# Altium footprint library PcbLib1.PcbLib: 24 footprints (part 2 of 2)
Each footprint in its own frame and in the unit in brackets; x right, y up, seen from the top. Pads: shape width x height; smd on the part's side, far side on the other; paste and mask are expansions set on the pad; w line width, h text height; cw(c..) or ccw(c..) is an arc to the next point about the centre after c.
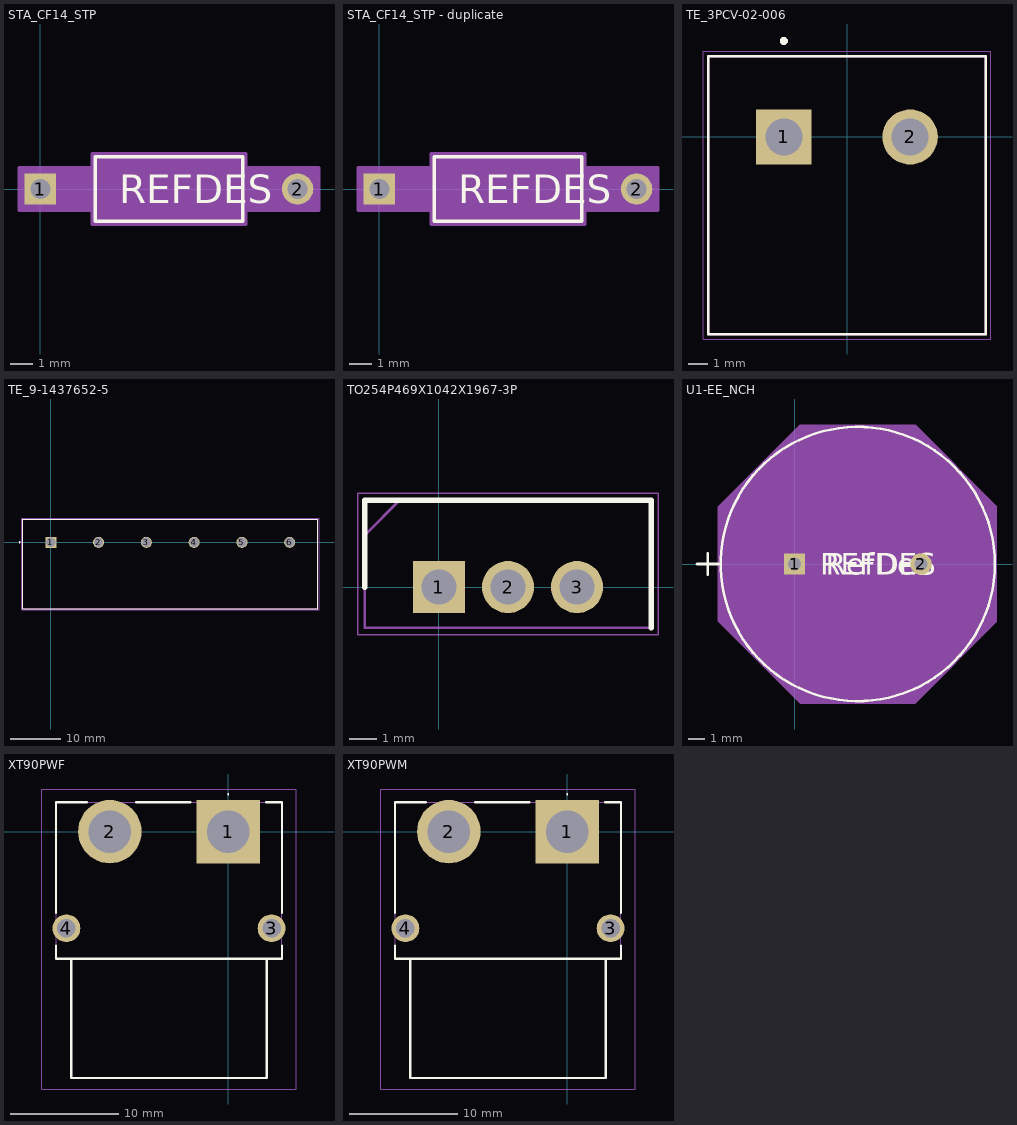
[diagram p1: the footprints below, top view; thin cyan lines are the x and y axes]

## STA_CF14_STP [mil]
pads (2):
  rect 55x55 / inner round 60 / far side rect 55x55 hole 35 paste-99999 mask+0: 1(0,0)
  round 55 / inner round 60 / far side round 55 hole 35 paste-99999 mask+0: 2(450,0)
Top Overlay:
  lines w6: 96,-56.5 354,-56.5 354,56.5 96,56.5 96,-56.5
  text "REFDES" at 137.5,-25 h50
Mechanical 13:
  lines w1: 0,0 101,0 ; 349,0 450,0 ; 101,-51.5 349,-51.5 349,51.5 101,51.5 101,-51.5
  text "RefDes2" at 137.5,-25 h50
Mechanical 15:
  region: 91,-37.5 -37.5,-37.5 -37.5,37.5 91,37.5 91,61.5 359,61.5 359,37.5 487.5,37.5 487.5,-37.5 359,-37.5 359,-61.5 91,-61.5
  lines w6: -37.5,-37.5 -37.5,37.5 91,37.5 91,61.5 359,61.5 359,37.5 487.5,37.5 487.5,-37.5 359,-37.5 359,-61.5 91,-61.5 91,-37.5 -37.5,-37.5
3D body "STA_CF14_STP.step": height 103, standoff -110, extent -12.48,-51.12 462.48,51.12

## STA_CF14_STP - duplicate [mil]
pads (2):
  rect 55x55 / inner round 60 / far side rect 55x55 hole 35 paste-99999 mask+0: 1(0,0)
  round 55 / inner round 60 / far side round 55 hole 35 paste-99999 mask+0: 2(450,0)
Top Overlay:
  lines w6: 96,-56.5 96,56.5 354,56.5 354,-56.5 96,-56.5
  text "REFDES" at 137.5,-25 h50
Mechanical 13:
  lines w1: 0,0 101,0 ; 349,0 450,0 ; 101,-51.5 101,51.5 349,51.5 349,-51.5 101,-51.5
  text "RefDes2" at 137.5,-25 h50
Mechanical 15:
  region: 91,-37.5 -37.5,-37.5 -37.5,37.5 91,37.5 91,61.5 359,61.5 359,37.5 487.5,37.5 487.5,-37.5 359,-37.5 359,-61.5 91,-61.5
  lines w6: -37.5,-37.5 91,-37.5 91,-61.5 359,-61.5 359,-37.5 487.5,-37.5 487.5,37.5 359,37.5 359,61.5 91,61.5 91,37.5 -37.5,37.5 -37.5,-37.5
3D body "STA_CF14_STP.step": height 103, standoff -110, extent -12.48,-51.12 462.48,51.12

## TE_3PCV-02-006 [mil]
height 500
pads (2):
  rect 109.5x109.5 / inner round 109.5 / far side rect 109.5x109.5 hole 73: 1(-125,0)
  round 109.5 hole 73: 2(125,0)
Top Overlay:
  circle w7.87: c-125,190 r3.94
  lines w5: -275,-390 275,-390 275,160 -275,160 -275,-390
Mechanical 13:
  circle w7.87: c-125,190 r3.94
  lines w5: -275,-390 275,-390 275,160 -275,160 -275,-390
Mechanical 15:
  lines w1.97: -284.84,-399.84 -284.84,169.84 284.84,169.84 284.84,-399.84 -284.84,-399.84
3D body "c-3-1437646-3-h-3d.stp": height 500, standoff -184.84, extent -270,-395 270,155

## TE_9-1437652-5 [mm]
pads (6):
  rect 2.204x2.204 hole 1.854: 1(0,0)
  round 2.204 hole 1.854: 2(9.53,0) 3(19.06,0) 4(28.59,0) 5(38.12,0) 6(47.65,0)
Top Overlay:
  circle w0.2: c-6.238,0 r0.1
  lines w0.127: -5.588,-13.208 -5.588,4.572 53.238,4.572 53.238,-13.208 -5.588,-13.208
Mechanical 13:
  circle w0.2: c-6.238,0 r0.1
  lines w0.127: -5.588,-13.208 -5.588,4.572 53.238,4.572 53.238,-13.208 ; -5.588,-13.208 53.238,-13.208 ; -5.588,-13.208 53.238,-13.208
Mechanical 15:
  lines w0.05: -5.838,-13.458 -5.838,4.822 53.488,4.822 53.488,-13.458 -5.838,-13.458
3D body "c-9-1437652-5-p-3d.stp": height 8.76, standoff -12.19, extent -5.601,-13.335 53.099,4.445

## TO254P469X1042X1967-3P [mm]
pads (3):
  rect 1.92x1.92 hole 1.28: 1(0,0)
  round 1.92 hole 1.28: 2(2.54,0) 3(5.08,0)
Top Overlay:
  lines w0.2: -2.73,0 -2.73,3.195 7.81,3.195 7.81,-1.495
Mechanical 13:
  lines w0.1: -2.73,1.925 -1.46,3.195 ; -2.73,-1.495 -2.73,3.195 7.81,3.195 7.81,-1.495 -2.73,-1.495
Mechanical 15:
  lines w0.05: -2.98,-1.745 -2.98,3.445 8.06,3.445 8.06,-1.745 -2.98,-1.745
3D body "IRF4905PBF.stp": height 18.84, standoff -17.51, extent -2.668,-1.495 7.748,3.195

## U1-EE_NCH [mil]
pads (2):
  rect 50x50 / inner round 60 / far side rect 50x50 hole 30 paste-99999 mask+0: 1(0,0)
  round 50 / inner round 60 / far side round 50 hole 30 paste-99999 mask+0: 2(295,0)
Top Overlay:
  circle w6: c147.5,0 r320
  lines w6: -227.5,0 -177.5,0 ; -202.5,-25 -202.5,25
  text "REFDES" at 60,-25 h50
  text "RefDes" at 72.5,-25 h50
Mechanical 13:
  circle w0: c147.5,0 r315
  lines w1: -227.5,0 -177.5,0 ; -202.5,-25 -202.5,25
  text "RefDes2" at 60,-25 h50
Mechanical 15:
  region: -177.5,133.82 13.68,325 281.32,325 472.5,133.82 472.5,-133.82 281.32,-325 13.68,-325 -177.5,-133.82
  lines w1: -177.5,-133.82 -177.5,133.82 13.68,325 281.32,325 472.5,133.82 472.5,-133.82 281.32,-325 13.68,-325 -177.5,-133.82
3D body "U1-EE_NCH.step": height 581.61, standoff -160, extent -167.48,-314.88 463.91,314.88

## XT90PWF [mm]
pads (4):
  rect 5.85x5.85 hole 3.9: 1(0,0)
  round 5.85 hole 3.9: 2(-10.9,0)
  round 2.565 hole 1.71: 3(4,-8.9) 4(-14.9,-8.9)
Top Overlay:
  lines w0.1: 0,3.4 cw(c0,3.45) 0,3.5 cw(c0,3.45) 0,3.4
  lines w0.2: -15.851,-10.5 -15.851,-11.7 4.95,-11.7 4.95,-10.5 ; -15.851,-7.5 -15.851,2.7 -13,2.7 ; -14.45,-11.7 -14.45,-22.7 3.55,-22.7 3.55,-11.7 ; -8.5,2.7 -3.5,2.7 ; 3.5,2.7 4.95,2.7 4.95,-7.5
Mechanical 15:
  lines w0.1: -14.45,-11.7 -14.45,-22.7 3.55,-22.7 3.55,-11.7 ; -15.851,-11.7 4.95,-11.7 4.95,2.7 -15.851,2.7 -15.851,-11.7
Mechanical 20:
  lines w0.1: -17.183,-23.7 6.282,-23.7 6.282,3.925 -17.183,3.925 -17.183,-23.7
3D body "XT90PW-F.stp": height 10.3, standoff -3.2, extent -16.42,-22.479 5.08,2.921

## XT90PWM [mm]
pads (4):
  rect 5.85x5.85 hole 3.9: 1(0,0)
  round 5.85 hole 3.9: 2(-10.9,0)
  round 2.565 hole 1.71: 3(4,-8.9) 4(-14.9,-8.9)
Top Overlay:
  lines w0.1: 0,3.4 ccw(c0,3.45) 0,3.5 ccw(c0,3.45) 0,3.4
  lines w0.2: -15.851,-10.5 -15.851,-11.7 4.95,-11.7 4.95,-10.5 ; -15.851,-7.5 -15.851,2.7 -13,2.7 ; -14.45,-11.7 -14.45,-22.7 3.55,-22.7 3.55,-11.7 ; -8.5,2.7 -3.5,2.7 ; 3.5,2.7 4.95,2.7 4.95,-7.5
Mechanical 15:
  lines w0.1: -14.45,-11.7 -14.45,-22.7 3.55,-22.7 3.55,-11.7 ; -15.851,-11.7 -15.851,2.7 4.95,2.7 4.95,-11.7 -15.851,-11.7
Mechanical 20:
  lines w0.1: -17.183,-23.7 -17.183,3.925 6.282,3.925 6.282,-23.7 -17.183,-23.7
3D body "XT90PW-M.stp": height 10.3, standoff -3.2, extent -15.934,-23.89 5.266,3.21